# Altium footprint library CANable.PcbLib: 23 footprints (part 2 of 2)
Each footprint in its own frame and in the unit in brackets; x right, y up, seen from the top. Pads: shape width x height; smd on the part's side, far side on the other; paste and mask are expansions set on the pad; w line width, h text height; cw(c..) or ccw(c..) is an arc to the next point about the centre after c.
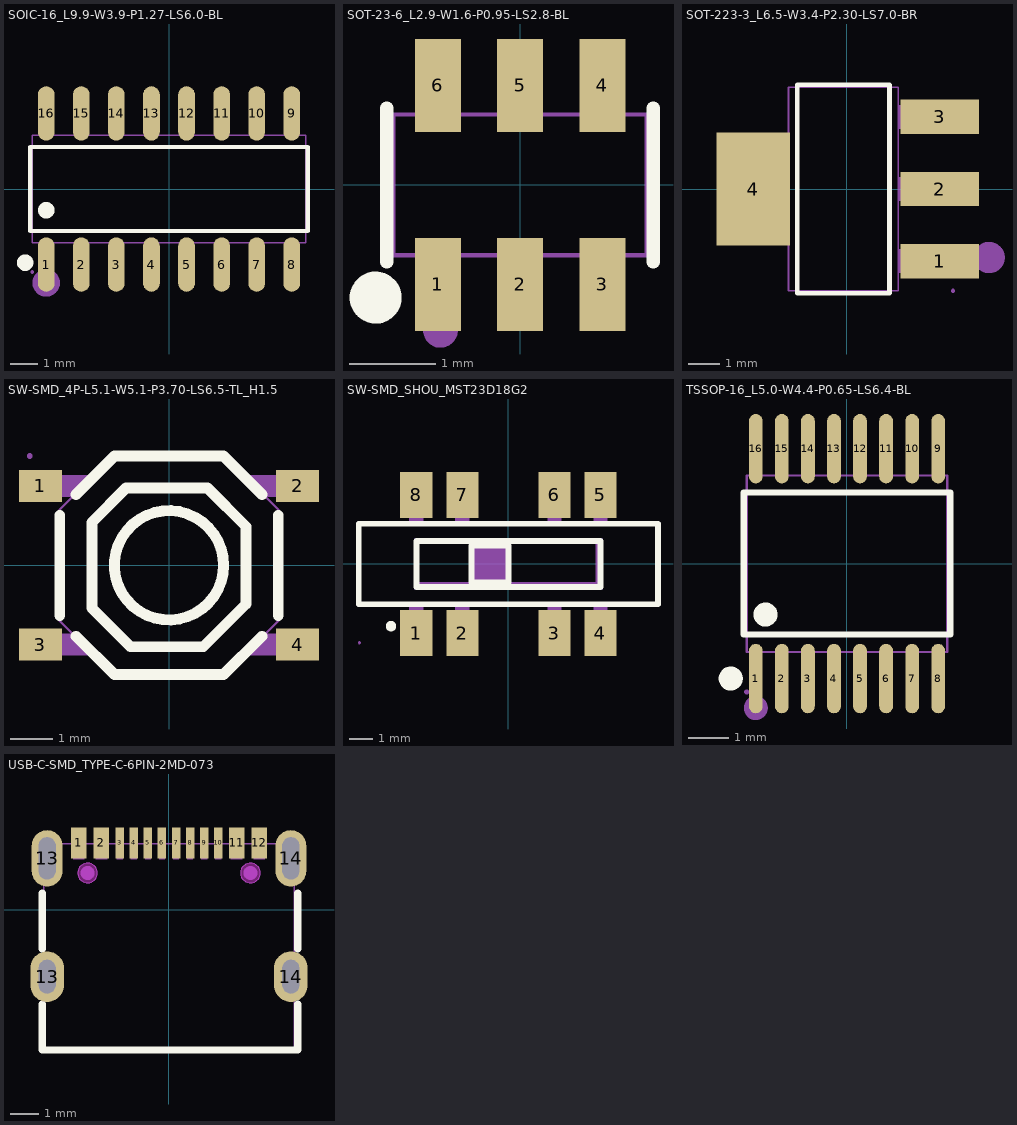
[diagram p1: the footprints below, top view; thin cyan lines are the x and y axes]

## SOIC-16_L9.9-W3.9-P1.27-LS6.0-BL [mm]
pads (16):
  oval 0.602x1.971 smd: 1(-4.445,-2.736) 2(-3.175,-2.736) 3(-1.905,-2.736) 4(-0.635,-2.736) 5(0.635,-2.736) 6(1.905,-2.736) 7(3.175,-2.736) 8(4.445,-2.736) 9(4.445,2.736) 10(3.175,2.736) 11(1.905,2.736) 12(0.635,2.736) 13(-0.635,2.736) 14(-1.905,2.736) 15(-3.175,2.736) 16(-4.445,2.736)
Top Overlay:
  circle w0.3: c-4.445,-0.769 r0.15
  circle w0.3: c-5.207,-2.667 r0.15
  lines w0.152: -5.026,-1.521 -5.026,1.521 5.026,1.521 5.026,-1.521 -5.026,-1.521
Mechanical 6:
  circle w0.5: c-4.445,-3.4 r0.25
Mechanical 15:
  drawing of 37 lines, arcs and shapes, not listed

## SOT-23-6_L2.9-W1.6-P0.95-LS2.8-BL [mm]
pads (6):
  rect 0.532x1.072 smd: 1(-0.95,-1.149) 2(0,-1.149) 3(0.95,-1.149) 4(0.95,1.149) 5(0,1.149) 6(-0.95,1.149)
Top Overlay:
  circle w0.3: c-1.668,-1.301 r0.15
  lines w0.152: -1.539,-0.889 -1.539,0.889 ; 1.539,-0.889 1.539,0.889
Mechanical 6:
  circle w0.2: c-0.92,-1.68 r0.1
Mechanical 15:
  region: -1.165,0.935 -0.735,0.935 -0.735,0.803 -1.165,0.803
  region: -1.165,0.925 -0.735,0.925 -0.735,1.4 -1.165,1.4
  region: -0.215,0.935 0.215,0.935 0.215,0.803 -0.215,0.803
  region: -0.215,0.925 0.215,0.925 0.215,1.4 -0.215,1.4
  region: 0.735,0.935 1.165,0.935 1.165,0.803 0.735,0.803
  region: 0.735,0.925 1.165,0.925 1.165,1.4 0.735,1.4
  region: 0.735,-0.803 1.165,-0.803 1.165,-0.935 0.735,-0.935
  region: 0.735,-0.925 1.165,-0.925 1.165,-1.4 0.735,-1.4
  region: -0.215,-0.803 0.215,-0.803 0.215,-0.935 -0.215,-0.935
  region: -0.215,-0.925 0.215,-0.925 0.215,-1.4 -0.215,-1.4
  region: -1.165,-0.803 -0.735,-0.803 -0.735,-0.935 -1.165,-0.935
  region: -1.165,-0.925 -0.735,-0.925 -0.735,-1.4 -1.165,-1.4
  region: -1.403,-1.4 -1.403,-1.425 -1.438,-1.46 -1.488,-1.46 -1.523,-1.425 -1.523,-1.4 -1.523,-1.375 -1.488,-1.34 -1.438,-1.34 -1.403,-1.375
  lines w0.051: -1.463,-0.813 -1.463,0.813 1.463,0.813 1.463,-0.813 -1.463,-0.813

## SOT-223-3_L6.5-W3.4-P2.30-LS7.0-BR [mm]
pads (4):
  rect 2.5x1.1 smd: 1(2.97,-2.3) 2(2.97,0) 3(2.97,2.3)
  rect 2.34x3.6 smd: 4(-2.97,0)
Top Overlay:
  lines w0.152: -1.571,-3.326 -1.571,3.326 1.371,3.326 1.371,-3.326 -1.571,-3.326
Mechanical 6:
  circle w0.5: c4.552,-2.188 r0.25
Mechanical 15:
  region: 3.46,-3.25 3.46,-3.275 3.425,-3.31 3.375,-3.31 3.34,-3.275 3.34,-3.25 3.34,-3.225 3.375,-3.19 3.425,-3.19 3.46,-3.225
  region: 1.64,1.925 1.64,2.675 2.66,2.675 2.66,1.925
  region: 2.65,1.925 2.65,2.675 3.4,2.675 3.4,1.925
  region: 1.64,-0.375 1.64,0.375 2.66,0.375 2.66,-0.375
  region: 2.65,-0.375 2.65,0.375 3.4,0.375 3.4,-0.375
  region: 1.64,-2.675 1.64,-1.925 2.66,-1.925 2.66,-2.675
  region: 2.65,-2.675 2.65,-1.925 3.4,-1.925 3.4,-2.675
  region: -2.86,-1.5 -2.86,1.5 -1.84,1.5 -1.84,-1.5
  region: -3.6,-1.5 -3.6,1.5 -2.85,1.5 -2.85,-1.5
  lines w0.051: -1.85,-3.25 -1.85,3.25 1.65,3.25 1.65,-3.25 -1.85,-3.25

## SW-SMD_4P-L5.1-W5.1-P3.70-LS6.5-TL_H1.5 [mm]
pads (4):
  rect 1x0.75 smd: 1(-3,1.85) 2(3,1.85) 3(-3,-1.85) 4(3,-1.85)
Top Overlay:
  circle w0.254: c0,0 r1.275
  lines w0.254: -2.55,-1.168 -2.55,1.168 ; -2.17,-1.655 -1.275,-2.55 1.275,-2.55 2.17,-1.655 ; -2.17,1.655 -1.275,2.55 1.275,2.55 2.17,1.655 ; 2.55,-1.168 2.55,1.168 ; -1.801,-0.998 -0.899,-1.9 0.8,-1.9 1.801,-0.899 1.801,0.899 0.899,1.801 -1.001,1.801 -1.801,1.001 -1.801,-0.998
Mechanical 15:
  region: -3.19,2.55 -3.19,2.525 -3.225,2.49 -3.275,2.49 -3.31,2.525 -3.31,2.55 -3.31,2.575 -3.275,2.61 -3.225,2.61 -3.19,2.575
  region: 2.85,-2.1 2.85,-1.6 3.25,-1.6 3.25,-2.1
  region: 2.2,1.6 1.7,2.1 2.86,2.1 2.86,1.6
  region: 2.85,1.6 2.85,2.1 3.25,2.1 3.25,1.6
  region: -3.25,1.599 -3.25,2.099 -2.85,2.099 -2.85,1.599
  region: -3.25,-2.1 -3.25,-1.6 -2.85,-1.6 -2.85,-2.1
  region: -2.2,-1.6 -1.7,-2.1 -2.86,-2.1 -2.86,-1.6
  region: 2.201,-1.601 1.701,-2.101 2.861,-2.101 2.861,-1.601
  region: -2.2,1.599 -1.7,2.099 -2.86,2.1 -2.86,1.6
  lines w0.051: -2.55,-1.3 -1.3,-2.55 1.3,-2.55 2.55,-1.3 2.55,1.3 1.3,2.55 -1.3,2.55 -2.55,1.3 -2.55,-1.3

## SW-SMD_SHOU_MST23D18G2 [mm]
pads (8):
  rect 1.4x2 smd: 1(-4,-3) 2(-2,-3) 3(2,-3) 4(4,-3) 5(4,3) 6(2,3) 7(-2,3) 8(-4,3)
Top Overlay:
  circle w0.254: c-5.1,-2.7 r0.1
  lines w0.254: -6.5,-1.75 6.5,-1.75 6.5,1.75 -6.5,1.75 -6.5,-1.75 ; -4,-1 4,-1 4,1 -4,1 -4,-1 ; -1.6,-0.8 0,-0.8 0,0.8 -1.6,0.8 -1.6,-0.8
Mechanical 6:
  region: -4,1.1 4.1,1.1 4.1,-1.1 -4.1,-1.1 -4.1,-0.8 3.8,-0.8 3.8,0.9 -4.1,0.9 -4.1,1.1
  region: -4.1,1.1 -3.9,1.1 -3.9,-1 -4.1,-1
  region: -1.7,0.9 0.1,0.9 0.1,-0.8 -1.7,-0.8 -1.7,-0.6
Mechanical 15:
  region: -6.415,-3.425 -6.415,-3.45 -6.45,-3.485 -6.5,-3.485 -6.535,-3.45 -6.535,-3.425 -6.535,-3.4 -6.5,-3.365 -6.45,-3.365 -6.415,-3.4
  region: -4.3,1.74 -4.3,2.635 -3.7,2.635 -3.7,1.74
  region: -4.3,2.625 -4.3,3.425 -3.7,3.425 -3.7,2.625
  region: -2.3,1.74 -2.3,2.635 -1.7,2.635 -1.7,1.74
  region: -2.3,2.625 -2.3,3.425 -1.7,3.425 -1.7,2.625
  region: 1.7,1.74 1.7,2.635 2.3,2.635 2.3,1.74
  region: 1.7,2.625 1.7,3.425 2.3,3.425 2.3,2.625
  region: 3.7,1.74 3.7,2.635 4.3,2.635 4.3,1.74
  region: 3.7,2.625 3.7,3.425 4.3,3.425 4.3,2.625
  region: 3.7,-2.635 3.7,-1.74 4.3,-1.74 4.3,-2.635
  region: 3.7,-3.425 3.7,-2.625 4.3,-2.625 4.3,-3.425
  region: 1.7,-2.635 1.7,-1.74 2.3,-1.74 2.3,-2.635
  region: 1.7,-3.425 1.7,-2.625 2.3,-2.625 2.3,-3.425
  region: -2.3,-2.635 -2.3,-1.74 -1.7,-1.74 -1.7,-2.635
  region: -2.3,-3.425 -2.3,-2.625 -1.7,-2.625 -1.7,-3.425
  region: -4.3,-2.635 -4.3,-1.74 -3.7,-1.74 -3.7,-2.635
  region: -4.3,-3.425 -4.3,-2.625 -3.7,-2.625 -3.7,-3.425
  lines w0.051: -6.475,-1.75 -6.475,1.75 6.475,1.75 6.475,-1.75 -6.475,-1.75

## TSSOP-16_L5.0-W4.4-P0.65-LS6.4-BL [mm]
pads (16):
  oval 0.343x1.731 smd: 1(-2.275,-2.866) 2(-1.625,-2.866) 3(-0.975,-2.866) 4(-0.325,-2.866) 5(0.325,-2.866) 6(0.975,-2.866) 7(1.625,-2.866) 8(2.275,-2.866) 9(2.275,2.866) 10(1.625,2.866) 11(0.975,2.866) 12(0.325,2.866) 13(-0.325,2.866) 14(-0.975,2.866) 15(-1.625,2.866) 16(-2.275,2.866)
Top Overlay:
  circle w0.3: c-2.899,-2.866 r0.15
  circle w0.3: c-2.032,-1.27 r0.15
  lines w0.152: -2.576,-1.771 2.576,-1.771 2.576,1.772 -2.576,1.772 -2.576,-1.771
Mechanical 6:
  circle w0.3: c-2.275,-3.6 r0.15
Mechanical 15:
  drawing of 37 lines, arcs and shapes, not listed

## USB-C-SMD_TYPE-C-6PIN-2MD-073 [mm]
pads (16):
  rect 0.55x1.1 smd paste-100 mask+0.05: 1(-3.2,2.375) 2(-2.4,2.375) 11(2.4,2.375) 12(3.2,2.375)
  rect 0.3x1.1 smd paste-100 mask+0.05: 3(-1.75,2.375) 4(-1.25,2.375) 5(-0.75,2.375) 6(-0.25,2.375) 7(0.25,2.375) 8(0.75,2.375) 9(1.25,2.375) 10(1.75,2.375)
  oval 1.2x1.8 hole 0.6 slot 1.2 at 90 deg paste+0 mask+0.05: 13(-4.325,-2.375) 14(4.325,-2.375)
  oval 1.1x2 hole 0.6 slot 1.5 at 90 deg paste+0 mask+0.05: 13(-4.325,1.825) 14(4.325,1.825)
Top Overlay:
  lines w0.254: -4.5,-3.356 -4.5,-4.975 4.571,-4.975 ; -4.5,-1.394 -4.5,0.594 ; 4.572,-4.973 4.572,-3.353 ; 4.572,-1.397 4.572,0.597
Top Paste:
  drawing of 16 lines, arcs and shapes, not listed
Keep-Out Layer:
  board cut-out: 3.24,1.305 3.24,1.235 3.187,1.107 3.088,1.008 2.96,0.955 2.821,0.955 2.692,1.008 2.593,1.107 2.54,1.235 2.54,1.305 2.54,1.375 2.593,1.503 2.692,1.602 2.821,1.655 2.96,1.655 3.088,1.602 3.187,1.503 3.24,1.375
  board cut-out: -2.54,1.305 -2.54,1.235 -2.593,1.107 -2.692,1.008 -2.82,0.955 -2.96,0.955 -3.088,1.008 -3.187,1.107 -3.24,1.235 -3.24,1.305 -3.24,1.375 -3.187,1.503 -3.088,1.602 -2.96,1.655 -2.82,1.655 -2.692,1.602 -2.593,1.503 -2.54,1.375
Keep-Out Layer:
  circle w0.025: c2.89,1.305 r0.35
  circle w0.025: c-2.89,1.305 r0.35
  region: 3.24,1.305 3.24,1.235 3.187,1.107 3.088,1.008 2.96,0.955 2.821,0.955 2.692,1.008 2.593,1.107 2.54,1.235 2.54,1.305 2.54,1.375 2.593,1.503 2.692,1.602 2.821,1.655 2.96,1.655 3.088,1.602 3.187,1.503 3.24,1.375
  region: -2.54,1.305 -2.54,1.235 -2.593,1.107 -2.692,1.008 -2.82,0.955 -2.96,0.955 -3.088,1.008 -3.187,1.107 -3.24,1.235 -3.24,1.305 -3.24,1.375 -3.187,1.503 -3.088,1.602 -2.96,1.655 -2.82,1.655 -2.692,1.602 -2.593,1.503 -2.54,1.375
Mechanical 1:
  circle w0.025: c2.89,1.305 r0.35
  circle w0.025: c-2.89,1.305 r0.35
Mechanical 6:
  circle w0.25: c2.89,1.305 r0.125
  circle w0.25: c-2.89,1.305 r0.125
Mechanical 15:
  region: 4.2,-2.025 4.45,-2.025 4.45,-2.725 4.2,-2.725
  region: -4.45,-2.025 -4.2,-2.025 -4.2,-2.725 -4.45,-2.725
  region: 4.2,2.349 4.45,2.349 4.45,1.249 4.2,1.249
  region: -4.45,2.349 -4.2,2.349 -4.2,1.249 -4.45,1.249
  region: 3,2.649 3.4,2.649 3.4,1.799 3,1.799
  region: 2.2,2.649 2.6,2.649 2.6,1.799 2.2,1.799
  region: -2.6,2.649 -2.2,2.649 -2.2,1.799 -2.6,1.799
  region: -3.4,2.649 -3,2.649 -3,1.799 -3.4,1.799
  region: 1.65,2.649 1.85,2.649 1.85,1.799 1.65,1.799
  region: 1.15,2.649 1.35,2.649 1.35,1.799 1.15,1.799
  region: 0.65,2.649 0.85,2.649 0.85,1.799 0.65,1.799
  region: 0.15,2.649 0.35,2.649 0.35,1.799 0.15,1.799
  region: -0.35,2.649 -0.15,2.649 -0.15,1.799 -0.35,1.799
  region: -1.35,2.649 -1.15,2.649 -1.15,1.799 -1.35,1.799
  region: -0.85,2.649 -0.65,2.649 -0.65,1.799 -0.85,1.799
  region: -1.85,2.649 -1.65,2.649 -1.65,1.799 -1.85,1.799
  region: -4.39,2.649 -4.39,2.624 -4.425,2.589 -4.475,2.589 -4.51,2.624 -4.51,2.649 -4.51,2.674 -4.475,2.709 -4.425,2.709 -4.39,2.674
  lines w0.051: -4.45,-5.001 4.45,-5.001 4.45,2.349 -4.45,2.349 -4.45,-5.001